# EAGLE library part SYN-QFN16-EP (library synthetic_all)
SYN-QFN16-EP Synthetic QFN-16 with exposed pad Source: JLCEDA/EasyEDA Official Library (https://lceda.cn/ , https://easyeda.com). Copyright of the library data belongs to JLCEDA/EasyEDA.
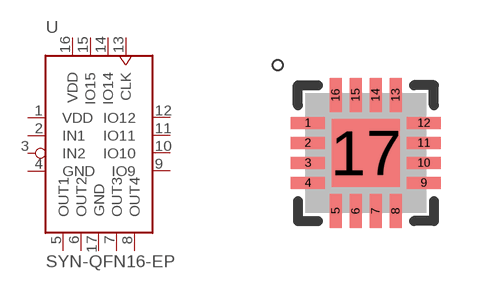
[diagram p4: symbol with the pads of SYN-QFN-16-EP; footprint SYN-QFN-16-EP]

Designator prefix U

## SYN-QFN16-EP (JLCPCB_CLASS: Basic Part; LCSC_PACKAGE: SYN-QFN-16-EP; LCSC_PART: C9000006; MANUFACTURER: SYN-Maker; MPN: SYN-QFN16-EP; SOURCE: Source: JLCEDA/EasyEDA Official Library (https://lceda.cn/ , https://easyeda.com). Copyright of the library data belongs to JLCEDA/EasyEDA.)  [SYN-QFN-16-EP]
1  VDD  pwr
2  IN1  in
3  IN2  in
4  GND  pwr
5  OUT1  out
6  OUT2  out
7  OUT3  out
8  OUT4  out
9  IO9
10  IO10
11  IO11
12  IO12
13  CLK  in
14  IO14
15  IO15
16  VDD  pwr
17  GND  pwr

## Footprint SYN-QFN-16-EP (pad centres in mm)
SYN-QFN-16-EP
smd 0.85 x 0.3: 1 -1.45,0.75; 2 -1.45,0.25; 3 -1.45,-0.25; 4 -1.45,-0.75; 9 1.45,-0.75; 10 1.45,-0.25; 11 1.45,0.25; 12 1.45,0.75
smd 0.3 x 0.85: 5 -0.75,-1.45; 6 -0.25,-1.45; 7 0.25,-1.45; 8 0.75,-1.45; 13 0.75,1.45; 14 0.25,1.45; 15 -0.25,1.45; 16 -0.75,1.45
smd 1.7 x 1.7: 17 0,0